# Altium footprint library ACB_PcbLib.PcbLib: 167 footprints (part 7 of 11)
Each footprint in its own frame and in the unit in brackets; x right, y up, seen from the top. Pads: shape width x height; smd on the part's side, far side on the other; paste and mask are expansions set on the pad; w line width, h text height; cw(c..) or ccw(c..) is an arc to the next point about the centre after c.
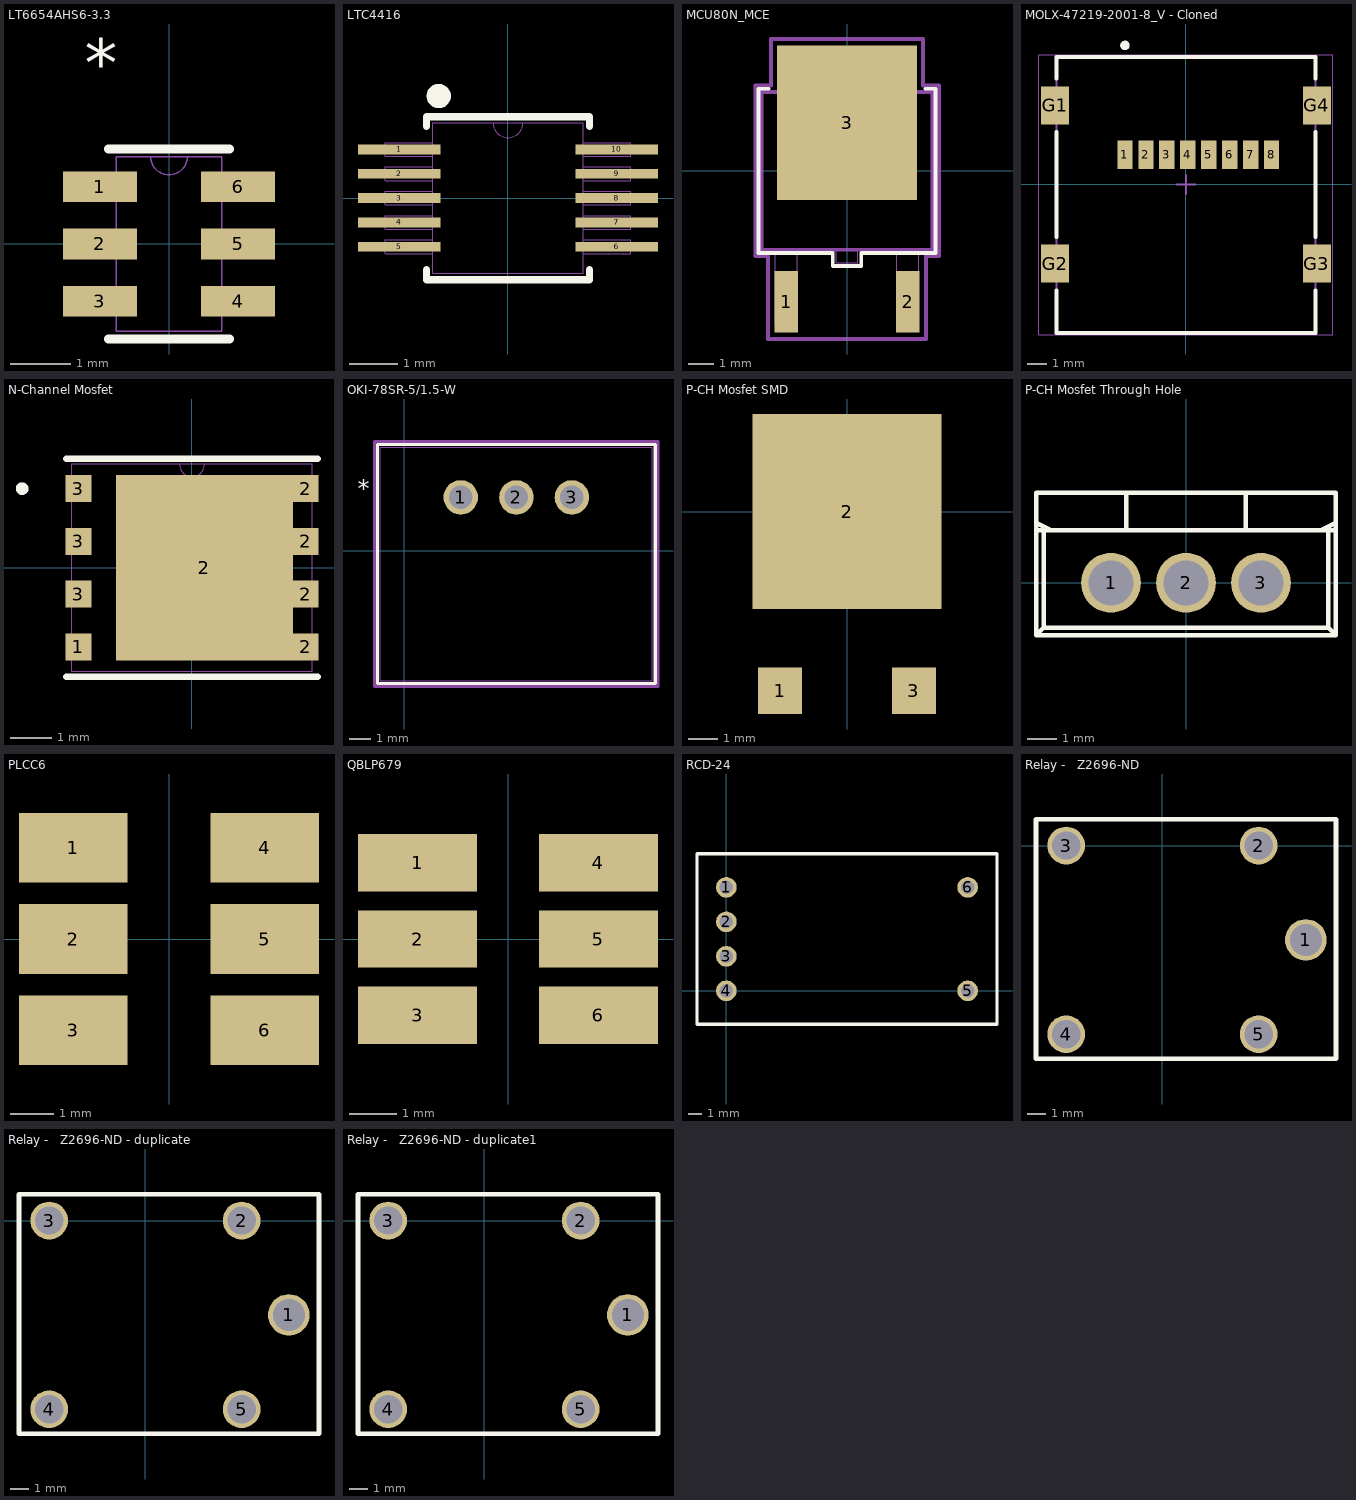
[diagram p6: the footprints below, top view; thin cyan lines are the x and y axes]

## LT6654AHS6-3.3 [mil]
pads (6):
  rect 48x20 smd: 1(-45,37.4) 2(-45,0) 3(-45,-37.4) 4(45,-37.4) 5(45,0) 6(45,37.4)
Top Overlay:
  lines w6: -39.5,-62 39.5,-62 ; -39.5,62 39.5,62
  text "*" at -55,102.4 h31.25
Mechanical 1:
  lines w1: -12,57 ccw(c0,57) 12,57 ; -55,-46.4 -34.5,-46.4 -34.5,-28.4 -55,-28.4 -55,-46.4 ; -55,-9 -34.5,-9 -34.5,9 -55,9 -55,-9 ; -55,28.4 -34.5,28.4 -34.5,46.4 -55,46.4 -55,28.4 ; -34.5,-57 -34.5,57 34.5,57 34.5,-57 -34.5,-57 ; 34.5,-46.4 55,-46.4 55,-28.4 34.5,-28.4 34.5,-46.4 ; 34.5,-9 55,-9 55,9 34.5,9 34.5,-9 ; 34.5,28.4 55,28.4 55,46.4 34.5,46.4 34.5,28.4
  text "*" at -19.5,54 h31.25

## LTC4416 [mil]
pads (10):
  rect 67x7.87 smd: 1(-88,39.4) 2(-88,19.7) 3(-88,0) 4(-88,-19.7) 5(-88,-39.4) 7(88,-19.7) 8(88,0) 9(88,19.7) 10(88,39.4)
  rect 67.01x7.87 smd: 6(88,-39.4)
Top Overlay:
  circle w9.84: c-56.1,82.68 r4.92
  lines w6: -66,-58 -66,-66 66,-66 66,-58 ; -66,58 -66,66 66,66 66,58
Mechanical 1:
  lines w1: -12,61 ccw(c0,61) 12,61 ; -99.5,-44.9 -61,-44.9 -61,-33.9 -99.5,-33.9 -99.5,-44.9 ; -99.5,-25.2 -61,-25.2 -61,-14.2 -99.5,-14.2 -99.5,-25.2 ; -99.5,-5.5 -61,-5.5 -61,5.5 -99.5,5.5 -99.5,-5.5 ; -99.5,14.2 -61,14.2 -61,25.2 -99.5,25.2 -99.5,14.2 ; -99.5,33.9 -61,33.9 -61,44.9 -99.5,44.9 -99.5,33.9 ; -61,-61 -61,61 61,61 61,-61 -61,-61 ; 61,-44.9 99.5,-44.9 99.5,-33.9 61,-33.9 61,-44.9 ; 61,-25.2 99.5,-25.2 99.5,-14.2 61,-14.2 61,-25.2 ; 61,-5.5 99.5,-5.5 99.5,5.5 61,5.5 61,-5.5 ; 61,14.2 99.5,14.2 99.5,25.2 61,25.2 61,14.2 ; 61,33.9 99.5,33.9 99.5,44.9 61,44.9 61,33.9
3D body "MSOP-10_MS-M.step": height 43.11, standoff 0, extent -99.48,-60.99 99.49,60.99

## MCU80N_MCE [mil]
pads (3):
  rect 36x95 smd: 1(-94,-202.5) 2(94,-202.5)
  rect 217x239 smd: 3(0,74.5)
Top Overlay:
  lines w6: -121.6,127 -137,127 -137,-127 -22,-127 -22,-147 22,-147 22,-127 137,-127 137,127 121.6,127
Mechanical 1:
  lines w1: -132,-122 -132,122 132,122 132,-122 -132,-122 ; -111,-236 -77,-236 -77,-122 -111,-122 -111,-236 ; -17,-142 17,-142 17,-122 -17,-122 -17,-142 ; 77,-236 111,-236 111,-122 77,-122 77,-236
  text "*" at -94,-112 h31.25
Mechanical 16:
  lines w6: -142,-132 -122,-132 -122,-260 122,-260 122,-132 142,-132 142,132 117.5,132 117.5,204 -117.5,204 -117.5,132 -142,132 -142,-132 ; -132,-122 -132,122 132,122 132,-122 -132,-122

## MOLX-47219-2001-8_V - Cloned [mm] "CONN, 8-Leads, Body 14.5x13.6mm, Pitch 1.1mm"
height 1.9
pads (12):
  rect 0.8x1.5 smd: 1(-3.205,1.55) 2(-2.105,1.55) 3(-1.005,1.55) 4(0.095,1.55) 5(1.195,1.55) 6(2.295,1.55) 7(3.395,1.55) 8(4.495,1.55)
  rect 1.45x2 smd: G1(-6.875,4.15) G2(-6.875,-4.15) G3(6.875,-4.15) G4(6.875,4.15)
Top Overlay:
  circle w0.25: c-3.205,7.3 r0.125
  lines w0.2: -6.8,-5.55 -6.8,-7.8 6.8,-7.8 6.8,-5.55 ; -6.8,-2.75 -6.8,2.75 ; -6.8,5.55 -6.8,6.7 6.8,6.7 6.8,5.55 ; 6.8,-2.75 6.8,2.75
Mechanical 13:
  lines w0.1: -6.8,-7.8 6.8,-7.8 6.8,6.7 -6.8,6.7 -6.8,-7.8
Mechanical 15:
  lines w0.05: -7.725,-7.9 7.7,-7.9 7.7,6.8 -7.725,6.8 -7.725,-7.9
  lines w0.1: -0.5,0 0.5,0 ; 0,-0.5 0,0.5
3D body "472192001.stp": height 1.91, standoff 0.02, extent -7.3,-7.793 7.3,6.707

## N-Channel Mosfet [mm]
pads (9):
  rect 0.63x0.65 smd: 1(-2.735,-1.905) 2(2.735,-1.905) 2(2.735,-0.635) 2(2.735,0.635) 2(2.735,1.905) 3(-2.735,-0.635) 3(-2.735,0.635) 3(-2.735,1.905)
  rect 4.27x4.46 smd: 2(0.3,0)
Top Overlay:
  circle w0.152: c-4.091,1.905 r0.076
  lines w0.152: -3.027,-2.627 3.027,-2.627 ; -3.027,2.627 3.027,2.627
Mechanical 1:
  circle w0.025: c-2.725,1.905 r0.076
  lines w0.025: -0.305,2.5 ccw(c0,2.5) 0.305,2.5 ; -2.9,-2.5 2.9,-2.5 2.9,2.5 -2.9,2.5 -2.9,-2.5
3D body: height 1, standoff 0, extent -2.54,-2.537 2.54,2.537

## OKI-78SR-5/1.5-W [mil]
pads (3):
  round 62 hole 42 mask-1000: 1(101.38,96.46) 2(201.38,96.46) 3(301.38,96.46)
Top Overlay:
  lines w6: -48.62,-238.54 -48.62,191.46 451.38,191.46 451.38,-238.54 -48.62,-238.54
  text "*" at -83.62,96.46 h31.25
Top Solder:
  region: 301.38,127.72 293.29,126.66 285.74,123.54 279.27,118.57 274.3,112.09 271.18,104.55 270.11,96.46 271.18,88.36 274.3,80.82 279.27,74.35 285.74,69.38 293.29,66.25 301.38,65.19 309.47,66.25 317.01,69.38 323.49,74.35 328.46,80.82 331.58,88.36 332.65,96.46 331.58,104.55 328.46,112.09 323.49,118.57 317.01,123.54 309.47,126.66
  region: 201.38,127.72 193.29,126.66 185.74,123.54 179.27,118.57 174.3,112.09 171.18,104.55 170.11,96.46 171.18,88.36 174.3,80.82 179.27,74.35 185.74,69.38 193.29,66.25 201.38,65.19 209.47,66.25 217.01,69.38 223.49,74.35 228.46,80.82 231.58,88.36 232.65,96.46 231.58,104.55 228.46,112.09 223.49,118.57 217.01,123.54 209.47,126.66
  region: 101.38,127.72 93.29,126.66 85.74,123.54 79.27,118.57 74.3,112.09 71.18,104.55 70.11,96.46 71.18,88.36 74.3,80.82 79.27,74.35 85.74,69.38 93.29,66.25 101.38,65.19 109.47,66.25 117.01,69.38 123.49,74.35 128.46,80.82 131.58,88.36 132.65,96.46 131.58,104.55 128.46,112.09 123.49,118.57 117.01,123.54 109.47,126.66
Bottom Solder:
  region: 301.38,127.72 293.29,126.66 285.74,123.54 279.27,118.57 274.3,112.09 271.18,104.55 270.11,96.46 271.18,88.36 274.3,80.82 279.27,74.35 285.74,69.38 293.29,66.25 301.38,65.19 309.47,66.25 317.01,69.38 323.49,74.35 328.46,80.82 331.58,88.36 332.65,96.46 331.58,104.55 328.46,112.09 323.49,118.57 317.01,123.54 309.47,126.66
  region: 201.38,127.72 193.29,126.66 185.74,123.54 179.27,118.57 174.3,112.09 171.18,104.55 170.11,96.46 171.18,88.36 174.3,80.82 179.27,74.35 185.74,69.38 193.29,66.25 201.38,65.19 209.47,66.25 217.01,69.38 223.49,74.35 228.46,80.82 231.58,88.36 232.65,96.46 231.58,104.55 228.46,112.09 223.49,118.57 217.01,123.54 209.47,126.66
  region: 101.38,127.72 93.29,126.66 85.74,123.54 79.27,118.57 74.3,112.09 71.18,104.55 70.11,96.46 71.18,88.36 74.3,80.82 79.27,74.35 85.74,69.38 93.29,66.25 101.38,65.19 109.47,66.25 117.01,69.38 123.49,74.35 128.46,80.82 131.58,88.36 132.65,96.46 131.58,104.55 128.46,112.09 123.49,118.57 117.01,123.54 109.47,126.66
Mechanical 1:
  lines w1: -43.62,-233.54 -43.62,186.46 446.38,186.46 446.38,-233.54 -43.62,-233.54
  text "*" at -33.62,96.46 h31.25
Mechanical 16:
  lines w6: -53.62,-243.54 456.38,-243.54 456.38,196.46 -53.62,196.46 -53.62,-243.54

## P-CH Mosfet SMD [mm]
pads (3):
  rect 1.5x1.6 smd: 1(-2.3,-6.15) 3(2.3,-6.15)
  rect 6.5x6.7 smd: 2(0,0)
3D body: height 0.5, standoff 0, extent 1.95,-6.044 2.65,-4.256
3D body: height 0.5, standoff 0, extent -2.65,-6.069 -1.95,-4.281
3D body: height 1.5, standoff 0, extent -3.25,-4.25 3.25,3

## P-CH Mosfet Through Hole [mil]
pads (3):
  round 80 hole 60: 1(-100,0) 2(0,0) 3(100,0)
Top Overlay:
  lines w6: -200,70 -180,70 ; -200,80 -180,70 ; -190,70 -190,-60 ; -80,120 -80,70 0,70 ; 80,120 80,70 0,70 ; 190,70 190,-60 ; 200,70 180,70 ; 200,80 180,70 ; -200,-70 -190,-60 ; -200,-70 -200,120 0,120 200,120 200,-70 ; -200,-70 0,-70 200,-70 ; -190,-60 0,-60 190,-60 ; -180,70 0,70 ; 0,70 180,70 ; 190,-60 200,-70
3D body: height 920, standoff 320, extent -200,70 200,120
3D body: height 670, standoff 320, extent -200,-70 200,70
3D body: height 160, standoff -120, extent 80,-20 120,20
3D body: height 320, standoff 160, extent 65,-20 135,20
3D body: height 320, standoff 160, extent -35,-20 35,20
3D body: height 160, standoff -120, extent -20,-20 20,20
3D body: height 320, standoff 160, extent -135,-20 -65,20
3D body: height 160, standoff -120, extent -120,-20 -80,20

## PCBComponent_1 [mm]

## PLCC6 [mm]
pads (6):
  rect 2.5x1.6 smd: 1(-2.2,2.1) 2(-2.2,0) 3(-2.2,-2.1) 4(2.2,2.1) 5(2.2,0) 6(2.2,-2.1)
3D body: height 2.5, standoff 0, extent -2.1,-2.8 2.2,2.8

## QBLP679 [mm]
pads (6):
  rect 2.5x1.2 smd: 1(-1.9,1.6) 2(-1.9,0) 3(-1.9,-1.6) 4(1.9,1.6) 5(1.9,0) 6(1.9,-1.6)
3D body: height 1.6, standoff 0, extent -2.095,-2.286 2.095,2.286

## RCD-24 [mil]
pads (6):
  round 60 hole 39.37: 1(0,300) 2(0,200) 3(0,100) 4(0,0) 5(700,0) 6(700,300)
Top Overlay:
  lines w10: -85.04,-96.85 785.04,-96.85 785.04,397.24 -85.04,397.24 -85.04,-96.85
  text "." at -55,425 h60
3D body: height 334.65, standoff 0, extent -85,-95 785,400

## Relay -   Z2696-ND [mm]
pads (5):
  round 2.2 hole 1.7: 1(7.6,-5)
  round 2 hole 1.5: 2(5.1,0) 3(-5.1,0) 4(-5.1,-10) 5(5.1,-10)
Top Overlay:
  lines w0.254: -6.7,-11.303 9.2,-11.303 9.2,1.397 -6.7,1.397 -6.7,-11.303

## Relay -   Z2696-ND - duplicate [mm]
pads (5):
  round 2.2 hole 1.7: 1(7.6,-5)
  round 2 hole 1.5: 2(5.1,0) 3(-5.1,0) 4(-5.1,-10) 5(5.1,-10)
Top Overlay:
  lines w0.254: -6.7,-11.303 -6.7,1.397 9.2,1.397 9.2,-11.303 -6.7,-11.303

## Relay -   Z2696-ND - duplicate1 [mm]
pads (5):
  round 2.2 hole 1.7: 1(7.6,-5)
  round 2 hole 1.5: 2(5.1,0) 3(-5.1,0) 4(-5.1,-10) 5(5.1,-10)
Top Overlay:
  lines w0.254: -6.7,-11.303 -6.7,1.397 9.2,1.397 9.2,-11.303 -6.7,-11.303

## Relay DPDT [mm]